# Altium schematic symbol library Schlib1.SchLib: 31 symbols
Pins are listed as number, name and electrical type; pins without a type are passive.

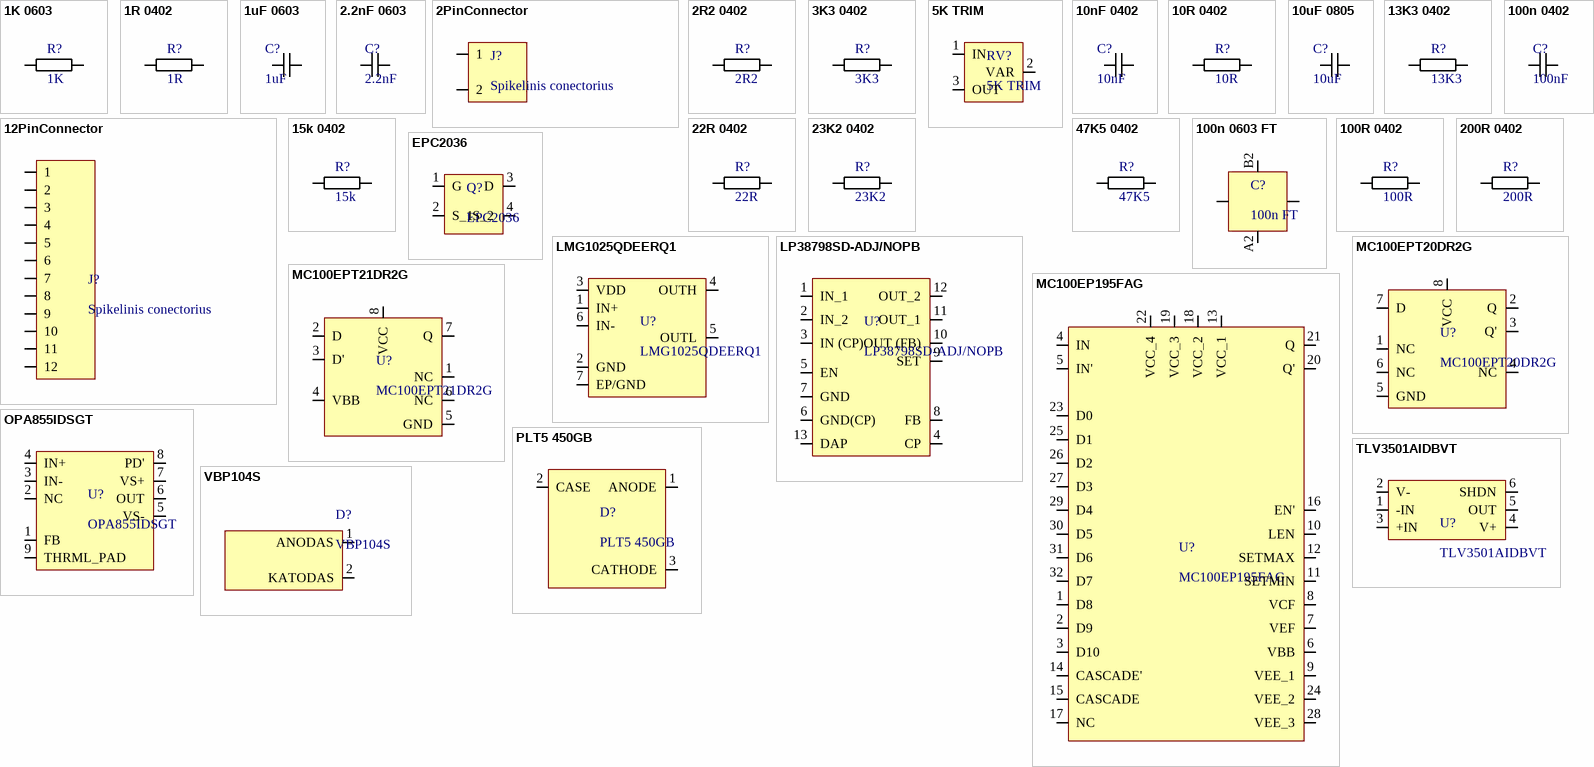
[diagram p0: symbols 1K 0603 to VBP104S]

## 1K 0603
designator R?, comment 1K
ERA-3AEB102V /
footprint 1k 0603 (ERA-3AEB102V)
pins: 1, 2

## 1R 0402
designator R?, comment 1R
CRT0402-FZ-1R00GLF /
footprint 1R 0402 (CRT0402-FZ-1R00GLF)
pins: 1, 2

## 1uF 0603
designator C?, comment 1uF
CGA3E1X7R1E105K080AC
footprint 1uF 0603 (CGA3E1X7R1E105K080AC)
pins: 1, 2

## 2.2nF 0603
designator C?, comment 2.2nF
C0603X222K1REC7411
footprint 2.2nF 0603
pins: 1, 2

## 2PinConnector
designator J?, comment Spikelinis conectorius
footprint 2Pin header strip
pins: 1, 2

## 2R2 0402
designator R?, comment 2R2
CRT0402-FZ-2R00GLF /
footprint 2R2 0402 (CRT0402-FZ-2R00GLF)
pins: 1, 2

## 3K3 0402
designator R?, comment 3K3
ERJ-U02F3301X /
footprint 3k3 0402 (ERJ-U02F3301X)
pins: 1, 2

## 5K TRIM
designator RV?
3314G-1-502E
footprint 5K TRIM (3314G-1-502E)
pins: 1 IN, 2 VAR, 3 OUT

## 10nF 0402
designator C?, comment 10nF
C0402C103J5RACTU
footprint 10nF 0402 (C0402C103J5RACTU)
pins: 1, 2

## 10R 0402
designator R?, comment 10R
CRT0402-DZ-10R0GLF /
footprint 10R 0402 (CRT0402-DZ-10R0GLF)
pins: 1, 2

## 10uF 0805
designator C?, comment 10uF
GRJ21BR61E106KE01K
footprint 10uF 0805 (GRJ21BR61E106KE01K)
pins: 1, 2

## 12PinConnector
designator J?, comment Spikelinis conectorius
TSW-112-07-G-S /
footprint 12pin header strip (TSW-112-07-G-S)
pins: 1, 2, 3, 4, 5, 6, 7, 8, 9, 10, 11, 12

## 13K3 0402
designator R?, comment 13K3
CRCW040213K3FKED
footprint 13k3 0402 (CRCW040213K3FKED)
pins: 1, 2

## 15k 0402
designator R?, comment 15k
CRCW040215K0FKED
footprint 15k 0402 (CRCW040215K0FKED)
pins: 1, 2

## 22R 0402
designator R?, comment 22R
ERA-2AKD220X /
footprint 22R 0402 (ERA-2AKD220X)
pins: 1, 2

## 23K2 0402
designator R?, comment 23K2
CR0402-FX-2322GLF /
footprint 23.2k 0402 (CR0402-FX-2322GLF)
pins: 1, 2

## 47K5 0402
designator R?, comment 47K5
CR0402-FX-4752GLF /
footprint 47.5k 0402 (CR0402-FX-4752GLF)
pins: 1, 2

## 100n 0402
designator C?, comment 100nF
C1005X7R1E104K050BB
footprint 100nF 0402 (C1005X7R1E104K050BB)
pins: 1, 2

## 100n 0603 FT
designator C?, comment 100n FT
NFM18PC104R1C3D
footprint 100n FT 0603 (NFM18PC104R1C3D)
pins: 1 INPUT, 3 OUTPUT, A2 GND_1, B2 GND_2

## 100R 0402
designator R?, comment 100R
ERA-2VEB1000X /
footprint 100R 0402 (ERA-2VEB1000X)
pins: 1, 2

## 200R 0402
designator R?, comment 200R
ERA-2AED201X /
footprint 200R 0402 (ERA-2AED201X)
pins: 1, 2

## EPC2036
designator Q?
footprint EPC2036
pins: 1 G, 2 S_1, 3 D, 4 S_2

## LMG1025QDEERQ1
designator U?
GaN Driver
footprint LMG1025QDEERQ1
pins: 1 IN+, 2 GND, 3 VDD, 4 OUTH, 5 OUTL, 6 IN-, 7 EP/GND

## LP38798SD-ADJ/NOPB
designator U?
input 3-20V output 1.5-5V
footprint LP38798SD-ADJ/NOPB
pins: 1 IN_1, 2 IN_2, 3 IN (CP), 4 CP, 5 EN, 6 GND(CP), 7 GND, 8 FB, 9 SET, 10 OUT (FB), 11 OUT_1, 12 OUT_2, 13 DAP

## MC100EP195FAG
designator U?
footprint MC100EP195FAG
pins: 1 D8, 2 D9, 3 D10, 4 IN, 5 IN', 6 VBB, 7 VEF, 8 VCF, 9 VEE_1, 10 LEN, 11 SETMIN, 12 SETMAX, 13 VCC_1, 14 CASCADE', 15 CASCADE, 16 EN', 17 NC, 18 VCC_2, 19 VCC_3, 20 Q', 21 Q, 22 VCC_4, 23 D0, 24 VEE_2, 25 D1, 26 D2, 27 D3, 28 VEE_3, 29 D4, 30 D5, 31 D6, 32 D7

## MC100EPT20DR2G
designator U?
footprint MC100EPT20DR2G
pins: 1 NC, 2 Q, 3 Q', 4 NC, 5 GND, 6 NC, 7 D, 8 VCC

## MC100EPT21DR2G
designator U?
footprint MC100EPT21DR2G
pins: 1 NC, 2 D, 3 D', 4 VBB, 5 GND, 6 NC, 7 Q, 8 VCC

## OPA855IDSGT
designator U?
OP ampas
footprint OPA855IDSGT
pins: 1 FB, 2 NC, 3 IN-, 4 IN+, 5 VS-, 6 OUT, 7 VS+, 8 PD', 9 THRML_PAD

## PLT5 450GB
designator D?
Lazeris
footprint PLT5 450GB
pins: 1 ANODE, 2 CASE, 3 CATHODE

## TLV3501AIDBVT
designator U?
Comparatorius
footprint TLV3501AIDBVT
pins: 1 -IN, 2 V-, 3 +IN, 4 V+, 5 OUT, 6 SHDN

## VBP104S
designator D?
FotoDiodas
footprint VBP104S
pins: 1 ANODAS, 2 KATODAS